# Altium integrated library VIETTIEN.IntLib: 194 symbols (part 3 of 9)

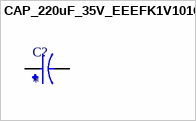
[diagram p46: symbol CAP_220uF_35V_EEEFK1V101GL]

## CAP_220uF_35V_EEEFK1V101GL
designator C?
CAP ALUM 100UF 20% 35V SMD; MF: Panasonic; MP: EEEFK1V101GL; SnapEDA_Link: https://www.snapeda.com/parts/EEEFK1V101GL/Panasonic/view-part/?ref=snap; Package: RADIAL-2 Panasonic; Value: *; Check_prices: https://www.snapeda.com/parts/EEEFK1V101GL/Panasonic/view-part/?ref=eda
footprint CAP_EEEFK1V101GL
pins: 1, 2


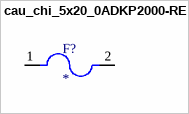
[diagram p47: symbol cau_chi_5x20_0ADKP2000-RE]

## cau_chi_5x20_0ADKP2000-RE
designator F?
Ceramic tube fuse | Axial Pigtail 5x20mm | UL | Slow Blow | 500mA | 600V; MP: 0ADKP2000-RE; Package: None; Price: None; Value: *; Availability: Unavailable
footprint FUSAD2722W65L2250D600
pins: 1, 2


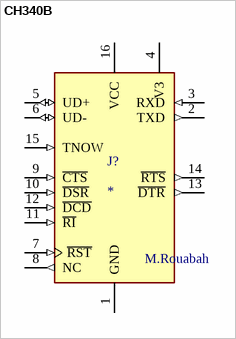
[diagram p48: symbol CH340B]

## CH340B
designator J?
MF: wch; MP: CH340B; SnapEDA_Link: https://www.snapeda.com/parts/CH340B/WCH/view-part/?ref=snap; Package: None; Value: *; Check_prices: https://www.snapeda.com/parts/CH340B/WCH/view-part/?ref=eda
footprint CH340B
pins: 1 GND (power), 2 TXD (out), 3 RXD (in), 4 V3 (power), 5 UD+ (io), 6 UD- (io), 7 ~{RST} (in), 8 NC (out), 9 ~{CTS} (in), 10 ~{DSR} (in), 11 ~{RI} (in), 12 ~{DCD} (in), 13 ~{DTR} (out), 14 ~{RTS} (out), 15 TNOW (in), 16 VCC (power)
text: M.Rouabah


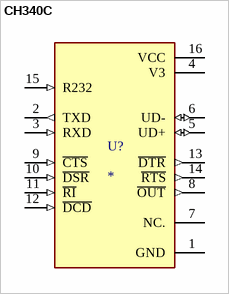
[diagram p49: symbol CH340C]

## CH340C
designator U?
USB to serial chip CH340; MP: CH340C; MF: WCH; Price: None; Availability: Not in stock; Package: None; SnapEDA_Link: https://www.snapeda.com/parts/CH340C/WCH/view-part/?ref=snap; Check_prices: https://www.snapeda.com/parts/CH340C/WCH/view-part/?ref=eda; Value: *
footprint CH340C
pins: 1 GND (power), 2 TXD (out), 3 RXD (in), 4 V3 (power), 5 UD+ (io), 6 UD- (io), 7 NC., 8 ~{OUT} (out), 9 ~{CTS} (in), 10 ~{DSR} (in), 11 ~{RI} (in), 12 ~{DCD} (in), 13 ~{DTR} (out), 14 ~{RTS} (out), 15 R232 (in), 16 VCC (power)


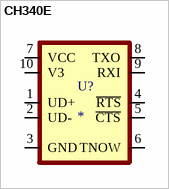
[diagram p50: symbol CH340E]

## CH340E
designator U?
USB to serial chip CH340; MF: WCH; MP: CH340E; SnapEDA_Link: https://www.snapeda.com/parts/CH340E/WCH/view-part/?ref=snap; Package: Package; Value: *; Check_prices: https://www.snapeda.com/parts/CH340E/WCH/view-part/?ref=eda
footprint CH340E
pins: 1 UD+ (io), 2 UD- (io), 3 GND (io), 4 ~{RTS} (io), 5 ~{CTS} (io), 6 TNOW (io), 7 VCC (io), 8 TXO (io), 9 RXI (io), 10 V3 (io)


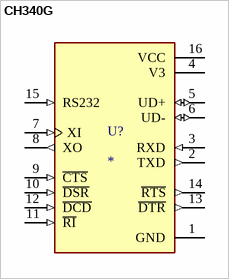
[diagram p51: symbol CH340G]

## CH340G
designator U?
USB Interface Integrated Circuit; MP: Ch340G; MF: WCH; Value: *; SnapEDA_Link: https://www.snapeda.com/parts/Ch340G/WCH/view-part/?ref=snap; Check_prices: https://www.snapeda.com/parts/Ch340G/WCH/view-part/?ref=eda; Availability: Not in stock; Price: None; Package: None
footprint CH340G
pins: 1 GND (power), 2 TXD (out), 3 RXD (in), 4 V3 (power), 5 UD+ (io), 6 UD- (io), 7 XI (in), 8 XO (out), 9 ~{CTS} (in), 10 ~{DSR} (in), 11 ~{RI} (in), 12 ~{DCD} (in), 13 ~{DTR} (out), 14 ~{RTS} (out), 15 RS232 (in), 16 VCC (power)


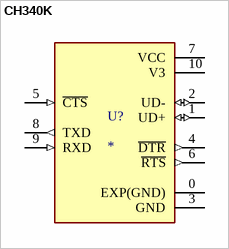
[diagram p52: symbol CH340K]

## CH340K
designator U?
USB to Serial Port Chip; MF: WCH; MP: CH340K; SnapEDA_Link: https://www.snapeda.com/parts/CH340K/WCH/view-part/?ref=snap; Package: Package; Value: *; Check_prices: https://www.snapeda.com/parts/CH340K/WCH/view-part/?ref=eda
footprint CH340K
pins: 0 EXP(GND) (power), 1 UD+ (io), 2 UD- (io), 3 GND (power), 4 ~{DTR} (out), 5 ~{CTS} (in), 6 ~{RTS} (out), 7 VCC (power), 8 TXD (out), 9 RXD (in), 10 V3 (power)


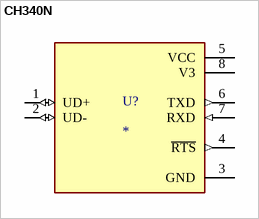
[diagram p53: symbol CH340N]

## CH340N
designator U?
USB to Serial Port Chip; MF: WCH; MP: CH340N; SnapEDA_Link: https://www.snapeda.com/parts/CH340N/WCH/view-part/?ref=snap; Package: Package; Value: *; Check_prices: https://www.snapeda.com/parts/CH340N/WCH/view-part/?ref=eda
footprint CH340N
pins: 1 UD+ (io), 2 UD- (io), 3 GND (power), 4 ~{RTS} (out), 5 VCC (power), 6 TXD (out), 7 RXD (in), 8 V3 (power)


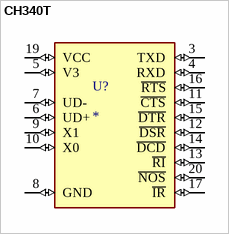
[diagram p54: symbol CH340T]

## CH340T
designator U?
Interface Development Tools USB - Serial Convert with CH340T; MF: wch; SnapEDA_Link: https://www.snapeda.com/parts/CH340T/WCH/view-part/?ref=snap; Package: None; Value: *; MP: CH340T; Check_prices: https://www.snapeda.com/parts/CH340T/WCH/view-part/?ref=eda
footprint CH340T
pins: 3 TXD (io), 4 RXD (io), 5 V3 (io), 6 UD+ (io), 7 UD- (io), 8 GND (io), 9 X1 (io), 10 X0 (io), 11 ~{CTS} (io), 12 ~{DSR} (io), 13 ~{RI} (io), 14 ~{DCD} (io), 15 ~{DTR} (io), 16 ~{RTS} (io), 17 ~{IR} (io), 19 VCC (io), 20 ~{NOS} (io)


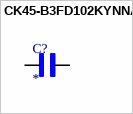
[diagram p55: symbol CK45-B3FD102KYNNA]

## CK45-B3FD102KYNNA
designator C?
1000 pF Â±10% 3000V (3kV) Ceramic Capacitor B Radial, Disc; MF: TDK; MP: CK45-B3FD102KYNNA; SnapEDA_Link: https://www.snapeda.com/parts/CK45-B3FD102KYNNA/TDK/view-part/?ref=snap; Package: None; Value: *; Check_prices: https://www.snapeda.com/parts/CK45-B3FD102KYNNA/TDK/view-part/?ref=eda
footprint CAPRB750W60L900T600H1300
pins: 1, 2


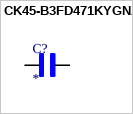
[diagram p56: symbol CK45-B3FD471KYGNA]

## CK45-B3FD471KYGNA
designator C?
MF: {'manufacturer': u'TDK'}; MP: CK45-B3FD471KYGNA; Package: None; Price: None; Value: *; Availability: Unavailable
footprint CAPRB750W60L700T600H1100
pins: 1, 2


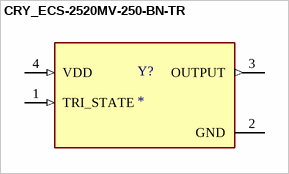
[diagram p57: symbol CRY_ECS-2520MV-250-BN-TR]

## CRY_ECS-2520MV-250-BN-TR
designator Y?
25 MHz XO (Standard) HCMOS Oscillator 1.6V ~ 3.6V Enable/Disable 4-SMD, No Lead; MF: ECS Inc.; MP: ECS-2520MV-250-BN-TR; SnapEDA_Link: https://www.snapeda.com/parts/ECS-2520MV-250-BN-TR/ECS/view-part/?ref=snap; Package: ECS-2520MV-0-4 ECS; Value: *; Check_prices: https://www.snapeda.com/parts/ECS-2520MV-250-BN-TR/ECS/view-part/?ref=eda
footprint OSC_ECS-2520S25-250-FN-TR
pins: 1 TRI_STATE (in), 2 GND (power), 3 OUTPUT (out), 4 VDD (in)


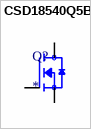
[diagram p58: symbol CSD18540Q5B]

## CSD18540Q5B
designator Q?
60-V, N channel NexFET™ power MOSFET, single SON 5 mm x 6 mm, 2.2 mOhm; MF: Texas Instruments; MP: CSD18540Q5B; SnapEDA_Link: https://www.snapeda.com/parts/CSD18540Q5B/Texas+Instruments/view-part/?ref=snap; Package: VSON-CLIP-8 Texas Instruments; Value: *; Check_prices: https://www.snapeda.com/parts/CSD18540Q5B/Texas+Instruments/view-part/?ref=eda
footprint TRANS_CSD18540Q5B
pins: 1 S, 2 S, 3 S, 4 G, 5_6_7_8 D


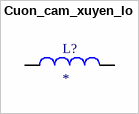
[diagram p59: symbol Cuon_cam_xuyen_lo]

## Cuon_cam_xuyen_lo
designator L?
Inductor 50125-33uH 8A; MF: {'manufacturer': u'W\xfcrth Elektronik'}; MP: 7447076; Package: None; Price: None; Value: *; Availability: Unavailable
footprint WE-FI_7447076
pins: 1, 2


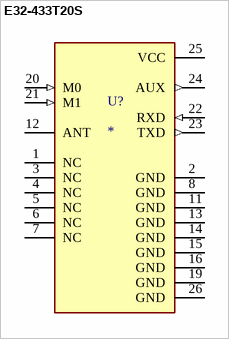
[diagram p60: symbol E32-433T20S]

## E32-433T20S
designator U?
Wireless serial port module (UART); MP: E32-433T20S; MF: EBYTE; Check_prices: https://www.snapeda.com/parts/E32-433T20S/EBYTE/view-part/?ref=eda; Package: Package; Value: *; SnapEDA_Link: https://www.snapeda.com/parts/E32-433T20S/EBYTE/view-part/?ref=snap; Price: None; Availability: Not in stock
footprint MODULE_E32-433T20S
pins: 1 NC, 2 GND (power), 3 NC, 4 NC, 5 NC, 6 NC, 7 NC, 8 GND (power), 11 GND (power), 12 ANT, 13 GND (power), 14 GND (power), 15 GND (power), 16 GND (power), 19 GND (power), 20 M0 (in), 21 M1 (in), 22 RXD (in), 23 TXD (out), 24 AUX (out), 25 VCC (power), 26 GND (power)


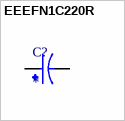
[diagram p61: symbol EEEFN1C220R]

## EEEFN1C220R
designator C?
CAP ALUM 22UF 20% 16V SMD; MF: Panasonic Electronic Components; MP: EEE-FN1C220R; Package: RADIAL-2 Panasonic; Value: *; Price: None; Check_prices: https://www.snapeda.com/parts/EEE-FN1C220R/Panasonic/view-part/6178704/?ref=eda; Purchase-URL: https://pricing.snapeda.com/search/part/EEE-FN1C220R/?ref=eda; Availability: In Stock; SnapEDA_Link: https://www.snapeda.com/parts/EEE-FN1C220R/Panasonic/view-part/6178704/?ref=snap
footprint CAP_EEEFN1C220R
pins: 1, 2


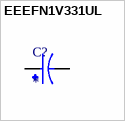
[diagram p62: symbol EEEFN1V331UL]

## EEEFN1V331UL
designator C?
CAP ALUM 330UF 20% 35V SMD; MF: Panasonic; MP: EEEFN1V331UL; SnapEDA_Link: https://www.snapeda.com/parts/EEEFN1V331UL/Panasonic/view-part/?ref=snap; Package: RADIAL-2 Panasonic; Value: *; Check_prices: https://www.snapeda.com/parts/EEEFN1V331UL/Panasonic/view-part/?ref=eda
footprint CAP_EEEFN1V331UL
pins: 1, 2


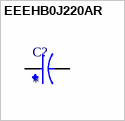
[diagram p63: symbol EEEHB0J220AR]

## EEEHB0J220AR
designator C?
CAP ALUM 22UF 20% 6.3V SMD; MF: Panasonic; MP: EEE-HB0J220AR; Availability: In Stock; Value: *; Check_prices: https://www.snapeda.com/parts/EEE-HB0J220AR/Panasonic/view-part/2368491/?ref=eda; Package: RADIAL-2 Panasonic; SnapEDA_Link: https://www.snapeda.com/parts/EEE-HB0J220AR/Panasonic/view-part/2368491/?ref=snap; Price: None; Purchase-URL: https://pricing.snapeda.com/search/part/EEE-HB0J220AR/?ref=eda
footprint CAP_EEEHB0J220AR
pins: 1, 2


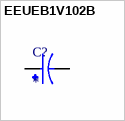
[diagram p64: symbol EEUEB1V102B]

## EEUEB1V102B
designator C?
Cap Aluminum 1000uF 35V 20% (12.5 X 25mm) Radial 5mm 586mA 10000 hr 105C Ammo Pack; MP: EEU-EB1V102B; MF: Panasonic; Check_prices: https://www.snapeda.com/parts/EEU-EB1V102B/Panasonic/view-part/?ref=eda; Package: RADIAL-2 Panasonic; SnapEDA_Link: https://www.snapeda.com/parts/EEU-EB1V102B/Panasonic/view-part/?ref=snap; Value: *; Purchase-URL: https://pricing.snapeda.com/search/part/EEU-EB1V102B/?ref=eda; Price: None; Availability: In Stock
footprint CAPPRD500W60D1250H2500
pins: N, P


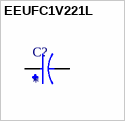
[diagram p65: symbol EEUFC1V221L]

## EEUFC1V221L
designator C?
220ÂµF 35V Aluminum Electrolytic Capacitors Radial, Can 2000 Hrs @ 105Â°C; MF: Panasonic; MP: EEUFC1V221L; Check_prices: https://www.snapeda.com/parts/EEUFC1V221L/Panasonic/view-part/906019/?ref=eda; SnapEDA_Link: https://www.snapeda.com/parts/EEUFC1V221L/Panasonic/view-part/906019/?ref=snap; Availability: In Stock; Package: RADIAL-2 Panasonic; Price: None; Value: *
footprint CAPPRD350W60D800H1500
pins: N, P


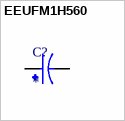
[diagram p66: symbol EEUFM1H560]

## EEUFM1H560
designator C?
Cap Aluminum Lytic 56uF 50V 20% (6 X 11.2mm) Radial 2.5mm 405mA 2000h 105C Bulk; MP: EEU-FM1H560; MF: Panasonic; Availability: In Stock; Purchase-URL: https://pricing.snapeda.com/search/part/EEU-FM1H560/?ref=eda; Package: RADIAL-2 Panasonic; Value: *; Check_prices: https://www.snapeda.com/parts/EEU-FM1H560/Panasonic/view-part/?ref=eda; SnapEDA_Link: https://www.snapeda.com/parts/EEU-FM1H560/Panasonic/view-part/?ref=snap; Price: None
footprint CAPPRD250W50D630H1120
pins: N, P


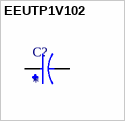
[diagram p67: symbol EEUTP1V102]

## EEUTP1V102
designator C?
1000ÂµF 35V Aluminum Electrolytic Capacitors Radial, Can 5000 Hrs @ 125Â°C; MF: Panasonic; MP: EEUTP1V102; SnapEDA_Link: https://www.snapeda.com/parts/EEUTP1V102/Panasonic/view-part/5792291/?ref=snap; Price: None; Check_prices: https://www.snapeda.com/parts/EEUTP1V102/Panasonic/view-part/5792291/?ref=eda; Package: RADIAL-2 Panasonic; Availability: In Stock; Value: *
footprint CAPPRD750W80D1600H2000
pins: N, P


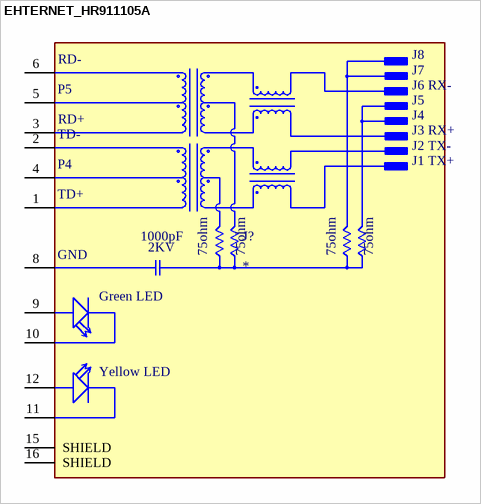
[diagram p68: symbol EHTERNET_HR911105A]

## EHTERNET_HR911105A
designator J?
DIP RJ45 Connector;; MP: HR911105A; MF: hanrun; SnapEDA_Link: https://www.snapeda.com/parts/HR911105A/HanRun/view-part/?ref=snap; Package: None; Check_prices: https://www.snapeda.com/parts/HR911105A/HanRun/view-part/?ref=eda; Price: None; Value: *; Availability: Not in stock
footprint HANRUN_HR911105A
pins: 1 TD+, 2 TD-, 3 RD+, 4 P4, 5 P5, 6 RD-, 8 GND (power), 9 GA, 10 GC, 11 YC, 12 YA, 15 SHIELD, 16 SHIELD
text: J8; J7; J6 RX-; J5; J4; J3 RX+; J2 TX-; J1 TX+; 1000pF; 2KV; 75ohm; Green LED; Yellow LED
